# Altium schematic symbol library MY_LIB_Semiconductors_IEC.SchLib: 13 symbols
Pins are listed as number, name and electrical type; pins without a type are passive.

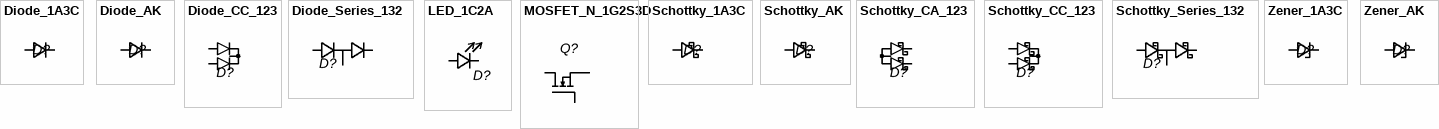
[diagram p0: symbols Diode_1A3C to Zener_AK]

## Diode_1A3C
designator D?  (value not drawn)
Diode; part1: A=1,C=3
pins: 1 A, 3 C

## Diode_AK
designator D?  (value not drawn)
Diode; part1: A=A,C=K
pins: A, K C

## Diode_CC_123
designator D?  (value not drawn)
Dual diode, common cathode
pins: 1 A1, 2 A2, 3 C

## Diode_Series_132
designator D?  (value not drawn)
Diode; two junctions in one symbol; SERIES; physical pins 1,2,3
pins: 1 A1, 2 C2, 3 C1/A2

## LED_1C2A
designator D?, comment LED  (value not drawn)
LED with pin 1 cathode and pin 2 anode
pins: 1 C, 2 A

## MOSFET_N_1G2S3D
designator Q?  (value not drawn)
Generic MOSFET_N; pin mapping 1G2S3D; geometry preserved from MOSFET_N
pins: 1 Gate, 2 Source, 3 Drain

## Schottky_1A3C
designator D?  (value not drawn)
Diode_Schottky; part1: A=1,C=3
pins: 1 A, 3 C

## Schottky_AK
designator D?  (value not drawn)
Diode_Schottky; part1: A=A,C=K
pins: A, K C

## Schottky_CA_123
designator D?  (value not drawn)
Dual Schottky diode, common anode
pins: 1 C1, 2 C2, 3 A

## Schottky_CC_123
designator D?  (value not drawn)
Dual Schottky diode, common cathode
pins: 1 A1, 2 A2, 3 C

## Schottky_Series_132
designator D?  (value not drawn)
Diode_Schottky; two junctions in one symbol; SERIES; physical pins 1,2,3
pins: 1 A1, 2 C2, 3 C1/A2

## Zener_1A3C
designator D?  (value not drawn)
Zener; part1: A=1,C=3
pins: 1 A, 3 C

## Zener_AK
designator D?  (value not drawn)
Zener; part1: A=A,C=K
pins: A, K C